# Altium schematic symbol library CP-01.SchLib: 63 symbols
Pins are listed as number, name and electrical type; pins without a type are passive.

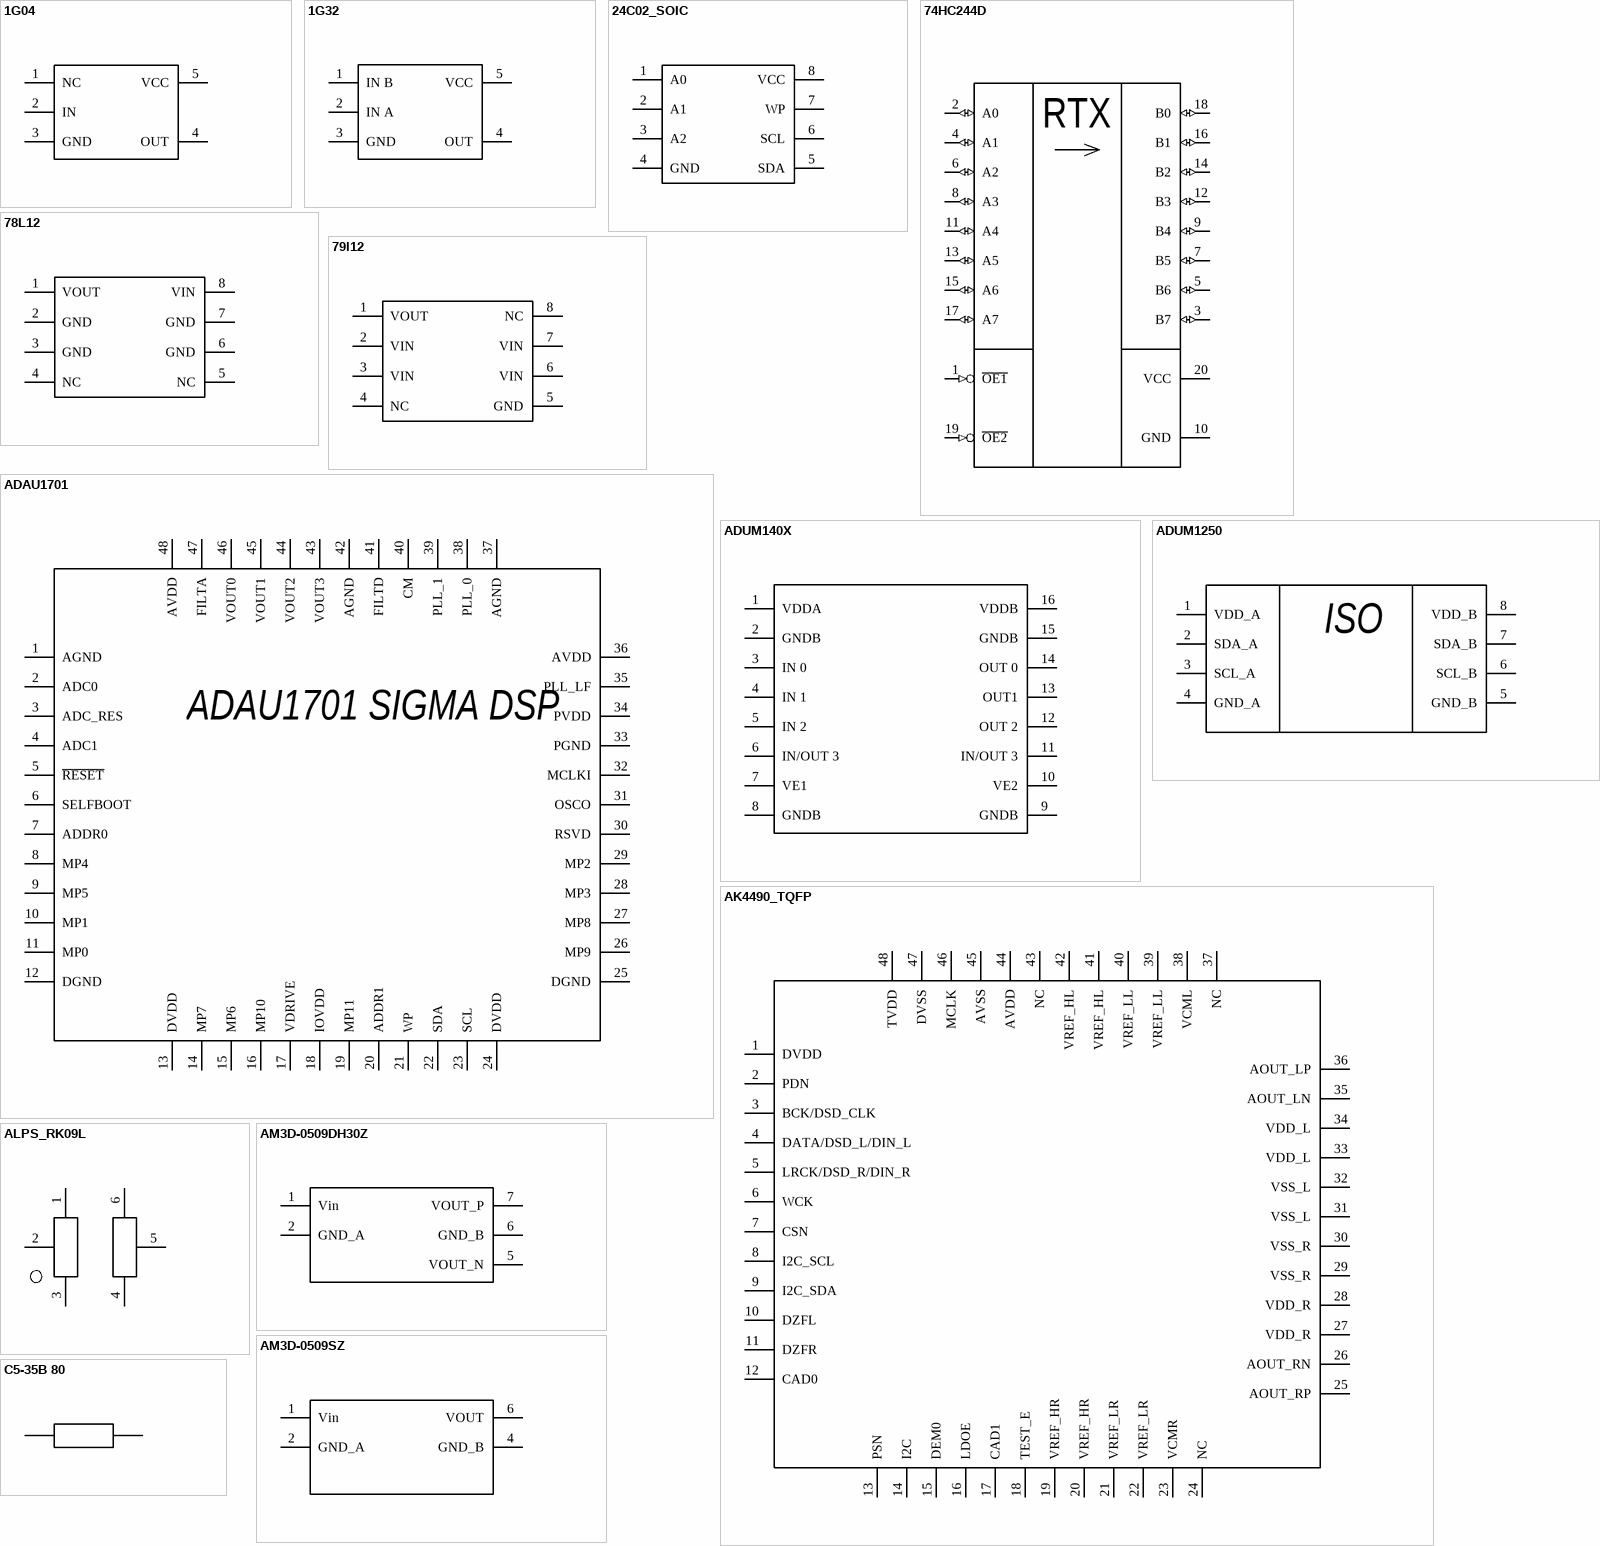
[diagram p0: symbols 1G04 to C5-35B 80]

## 1G04
designator D?, comment Обозначение при заказе  (value not drawn)
Описание свойств компонента
footprint SOT23-5P95_280X145L45X40N (Small Outline Transistor (SOT23), 0.95 mm pitch; 5 pin, 2.90 mm L X 1.60 mm W X 1.45 mm H body)
pins: 1 NC "Назначение вывода", 2 IN "Назначение вывода", 3 GND "Назначение вывода", 4 OUT "Назначение вывода", 5 VCC "Назначение вывода"

## 1G32
designator D?, comment Обозначение при заказе  (value not drawn)
Описание свойств компонента
footprint SOT23-5P95_280X145L45X40N (Small Outline Transistor (SOT23), 0.95 mm pitch; 5 pin, 2.90 mm L X 1.60 mm W X 1.45 mm H body)
pins: 1 IN B "Назначение вывода", 2 IN A "Назначение вывода", 3 GND "Назначение вывода", 4 OUT "Назначение вывода", 5 VCC "Назначение вывода"

## 24C02_SOIC
designator D?, comment Обозначение при заказе  (value not drawn)
Описание свойств компонента
footprint SOIC8P127_490X600X175L65X42N (Small Outline IC (SOIC), 1.27 mm pitch; 8 pin, 4.905 mm L X 3.90 mm W X 1.75 mm H body)
pins: 1 A0 "Назначение вывода", 2 A1 "Назначение вывода", 3 A2 "Назначение вывода", 4 GND "Назначение вывода", 5 SDA "Назначение вывода", 6 SCL "Назначение вывода", 7 WP "Назначение вывода", 8 VCC "Назначение вывода"

## 74HC244D
designator X?, comment Обозначение при заказе  (value not drawn)
Описание свойств компонента
footprint SOIC20P127_1280X1031X265L83X41N (Small Outline IC (SOIC), 1.27 mm pitch; 20 pin, 12.80 mm L X 7.50 mm W X 2.65 mm H body)
pins: 1 ~{OE1} (in) "Управление направлением", 2 A0 (io) "Канал 1", 3 B7 (io) "GND", 4 A1 (io) "Управление направлением", 5 B6 (io) "GND", 6 A2 (io) "Управление направлением", 7 B5 (io) "GND", 8 A3 (io) "Управление направлением", 9 B4 (io) "GND", 10 GND (power), 11 A4 (io) "Управление направлением", 12 B3 (io) "GND", 13 A5 (io) "Управление направлением", 14 B2 (io) "GND", 15 A6 (io) "Управление направлением", 16 B1 (io) "GND", 17 A7 (io) "Управление направлением", 18 B0 (io) "GND", 19 ~{OE2} (in) "GND", 20 VCC (power) "Vcc"
text: RTX

## 78L12
designator X?, comment Обозначение при заказе  (value not drawn)
Описание свойств компонента
footprint RT424012
pins: 1 VOUT "Назначение вывода", 2 GND "Назначение вывода", 3 GND "Назначение вывода", 4 NC "Назначение вывода", 5 NC "Назначение вывода", 6 GND "Назначение вывода", 7 GND "Назначение вывода", 8 VIN "Назначение вывода"

## 79l12
designator X?, comment Обозначение при заказе  (value not drawn)
Описание свойств компонента
pins: 1 VOUT "Назначение вывода", 2 VIN "Назначение вывода", 3 VIN "Назначение вывода", 4 NC "Назначение вывода", 5 GND "Назначение вывода", 6 VIN "Назначение вывода", 7 VIN "Назначение вывода", 8 NC "Назначение вывода"

## ADAU1701
designator X?, comment ADAU1701JSTZ  (value not drawn)
SigmaDSP 28-/56-Bit Audio Processor with Two ADCs and Four DACs
footprint QFP50P900X900X160-48N
pins: 1 AGND "Назначение вывода", 2 ADC0 "Назначение вывода", 3 ADC_RES "Назначение вывода", 4 ADC1 "Назначение вывода", 5 ~{RESET} "Назначение вывода", 6 SELFBOOT "Назначение вывода", 7 ADDR0 "Назначение вывода", 8 MP4 "Назначение вывода", 9 MP5 "Назначение вывода", 10 MP1 "Назначение вывода", 11 MP0 "Назначение вывода", 12 DGND "Назначение вывода", 13 DVDD "Назначение вывода", 14 MP7 "Назначение вывода", 15 MP6 "Назначение вывода", 16 MP10 "Назначение вывода", 17 VDRIVE "Назначение вывода", 18 IOVDD "Назначение вывода", 19 MP11 "Назначение вывода", 20 ADDR1 "Назначение вывода", 21 WP "Назначение вывода", 22 SDA "Назначение вывода", 23 SCL "Назначение вывода", 24 DVDD "Назначение вывода", 25 DGND "Назначение вывода", 26 MP9 "Назначение вывода", 27 MP8 "Назначение вывода", 28 MP3 "Назначение вывода", 29 MP2 "Назначение вывода", 30 RSVD "Назначение вывода", 31 OSCO "Назначение вывода", 32 MCLKI "Назначение вывода", 33 PGND "Назначение вывода", 34 PVDD "Назначение вывода", 35 PLL_LF "Назначение вывода", 36 AVDD "Назначение вывода", 37 AGND "Назначение вывода", 38 PLL_0 "Назначение вывода", 39 PLL_1 "Назначение вывода", 40 CM "Назначение вывода", 41 FILTD "Назначение вывода", 42 AGND "Назначение вывода", 43 VOUT3 "Назначение вывода", 44 VOUT2 "Назначение вывода", 45 VOUT1 "Назначение вывода", 46 VOUT0 "Назначение вывода", 47 FILTA "Назначение вывода", 48 AVDD "Назначение вывода"
text: ADAU1701 SIGMA DSP

## ADUM140X
designator D?, comment Обозначение при заказе  (value not drawn)
Описание свойств компонента
footprint adum1400
pins: 1 VDDA "Назначение вывода", 2 GNDB "Назначение вывода", 3 IN 0 "Назначение вывода", 4 IN 1 "Назначение вывода", 5 IN 2 "Назначение вывода", 6 IN/OUT 3 "Назначение вывода", 7 VE1 "Назначение вывода", 8 GNDB "Назначение вывода", 9 GNDB "Назначение вывода", 10 VE2 "Назначение вывода", 11 IN/OUT 3 "Назначение вывода", 12 OUT 2 "Назначение вывода", 13 OUT1 "Назначение вывода", 14 OUT 0 "Назначение вывода", 15 GNDB "Назначение вывода", 16 VDDB "Назначение вывода"

## ADUM1250
designator D?, comment Обозначение при заказе  (value not drawn)
Описание свойств компонента
footprint SOIC8P127_490X600X175L65X42N (Small Outline IC (SOIC), 1.27 mm pitch; 8 pin, 4.905 mm L X 3.90 mm W X 1.75 mm H body)
pins: 1 VDD_A "Назначение вывода", 2 SDA_A "Назначение вывода", 3 SCL_A "Назначение вывода", 4 GND_A "Назначение вывода", 5 GND_B "Назначение вывода", 6 SCL_B "Назначение вывода", 7 SDA_B "Назначение вывода", 8 VDD_B "Назначение вывода"
text: ISO

## AK4490_TQFP
designator D?, comment Обозначение при заказе  (value not drawn)
Описание свойств компонента
footprint QFP50P900X900X160-48N
pins: 1 DVDD "Назначение вывода", 2 PDN "Назначение вывода", 3 BCK/DSD_CLK "Назначение вывода", 4 DATA/DSD_L/DIN_L "Назначение вывода", 5 LRCK/DSD_R/DIN_R "Назначение вывода", 6 WCK "Назначение вывода", 7 CSN "Назначение вывода", 8 I2C_SCL "Назначение вывода", 9 I2C_SDA "Назначение вывода", 10 DZFL "Назначение вывода", 11 DZFR "Назначение вывода", 12 CAD0 "Назначение вывода", 13 PSN "Назначение вывода", 14 I2C "Назначение вывода", 15 DEM0 "Назначение вывода", 16 LDOE "Назначение вывода", 17 CAD1 "Назначение вывода", 18 TEST_E "Назначение вывода", 19 VREF_HR "Назначение вывода", 20 VREF_HR "Назначение вывода", 21 VREF_LR "Назначение вывода", 22 VREF_LR "Назначение вывода", 23 VCMR "Назначение вывода", 24 NC "Назначение вывода", 25 AOUT_RP "Назначение вывода", 26 AOUT_RN "Назначение вывода", 27 VDD_R "Назначение вывода", 28 VDD_R "Назначение вывода", 29 VSS_R "Назначение вывода", 30 VSS_R "Назначение вывода", 31 VSS_L "Назначение вывода", 32 VSS_L "Назначение вывода", 33 VDD_L "Назначение вывода", 34 VDD_L "Назначение вывода", 35 AOUT_LN "Назначение вывода", 36 AOUT_LP "Назначение вывода", 37 NC "Назначение вывода", 38 VCML "Назначение вывода", 39 VREF_LL "Назначение вывода", 40 VREF_LL "Назначение вывода", 41 VREF_HL "Назначение вывода", 42 VREF_HL "Назначение вывода", 43 NC "Назначение вывода", 44 AVDD "Назначение вывода", 45 AVSS "Назначение вывода", 46 MCLK "Назначение вывода", 47 DVSS "Назначение вывода", 48 TVDD "Назначение вывода"

## ALPS_RK09L
designator R?, comment Обозначение при заказе  (value not drawn)
Описание свойств компонента
footprint RK09L
pins: 1 "Назначение вывода", 2 "Назначение вывода", 3 "Назначение вывода", 4 "Назначение вывода", 5 "Назначение вывода", 6 "Назначение вывода"

## AM3D-0509DH30Z
designator D?, comment Обозначение при заказе  (value not drawn)
Описание свойств компонента
footprint AM3D-0509DH30Z
pins: 1 Vin "Назначение вывода", 2 GND_A "Назначение вывода", 5 VOUT_N "Назначение вывода", 6 GND_B "Назначение вывода", 7 VOUT_P "Назначение вывода"

## AM3D-0509SZ
designator D?, comment Обозначение при заказе  (value not drawn)
Описание свойств компонента
footprint AM3D-0509SZ
pins: 1 Vin "Назначение вывода", 2 GND_A "Назначение вывода", 4 GND_B "Назначение вывода", 6 VOUT "Назначение вывода"

## C5-35B 80
designator R?, comment Обозначение при заказе  (value not drawn)
Описание свойств компонента
footprint C5-35 80
pins: 1, 2

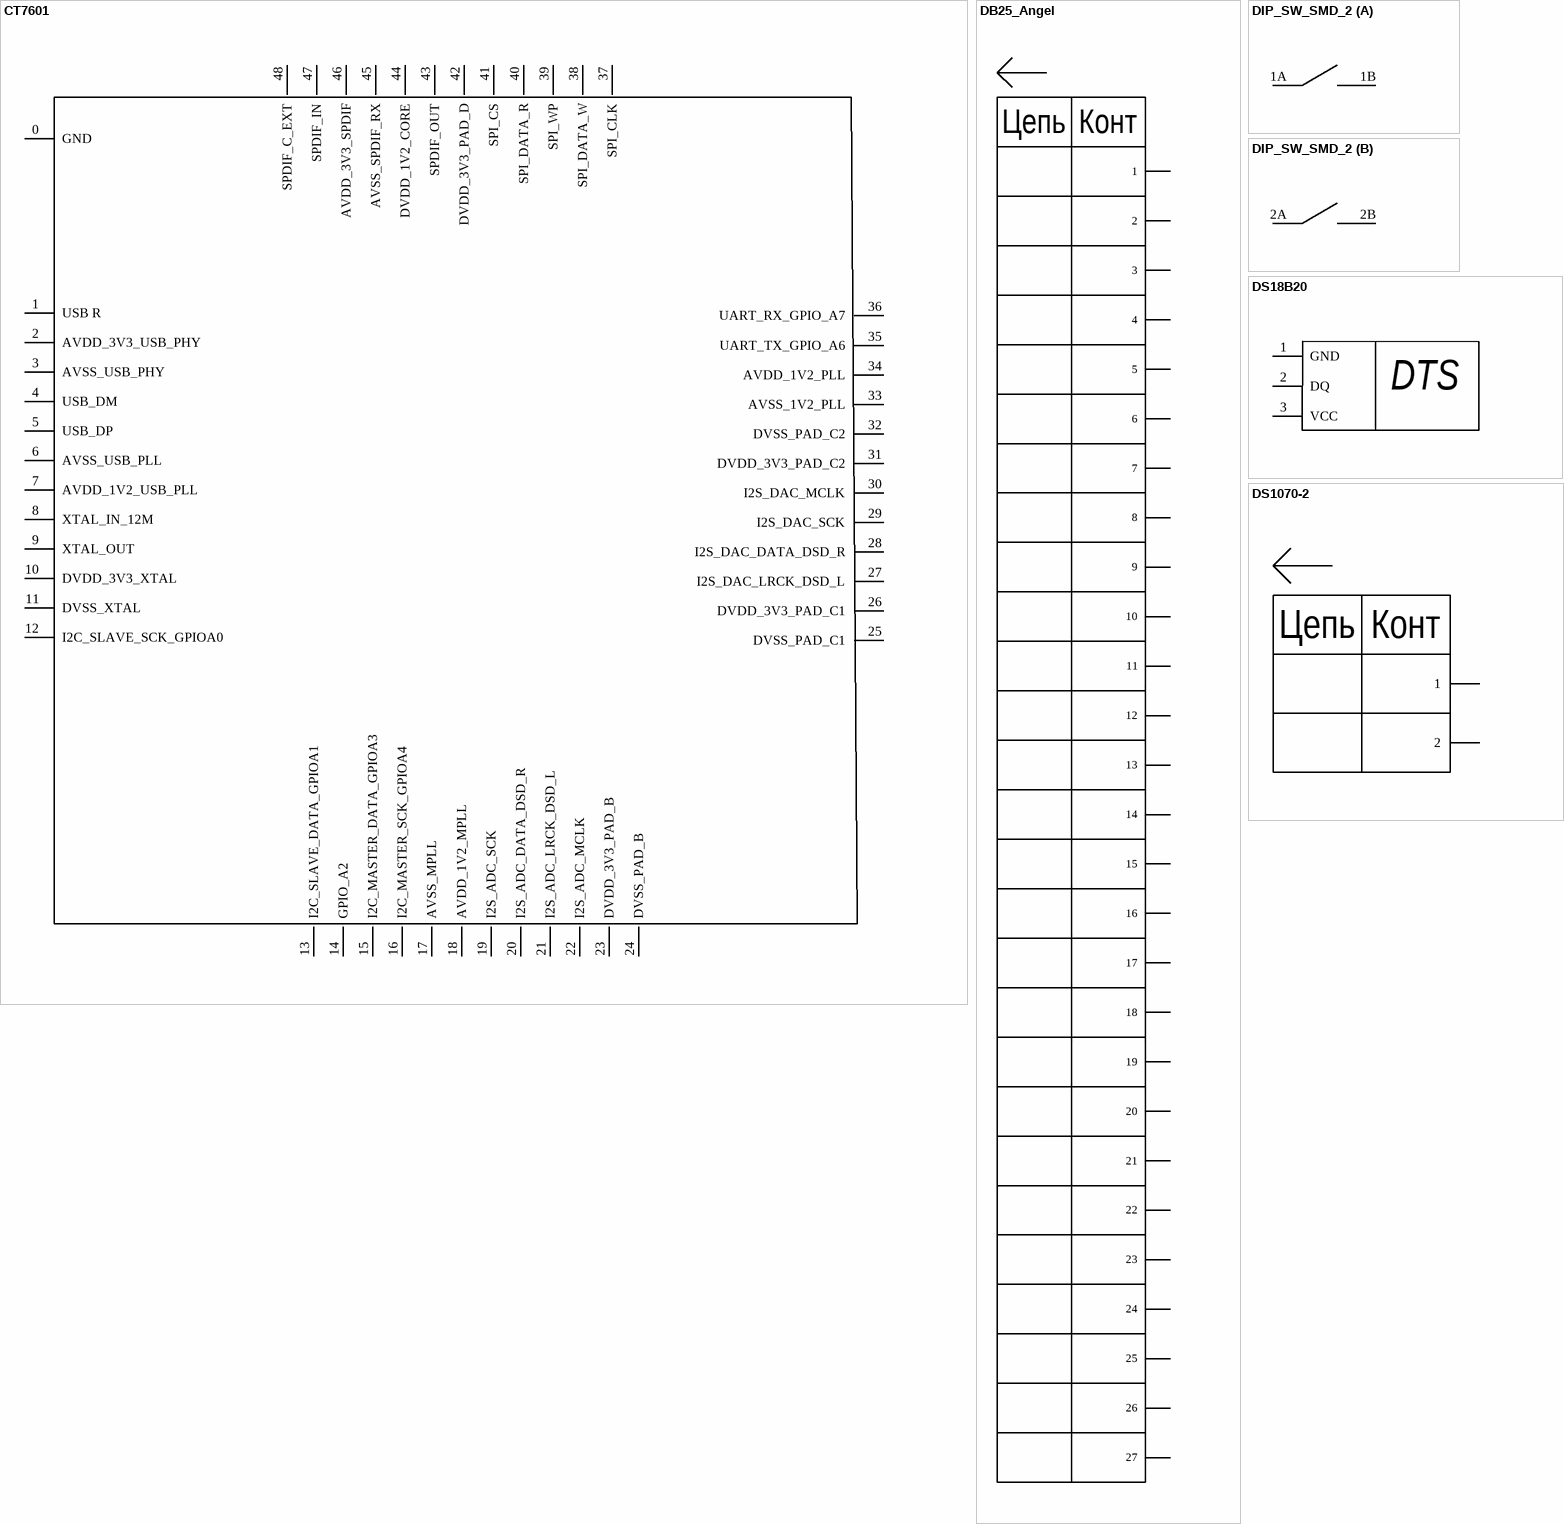
[diagram p1: symbols CT7601 to DS1070-2]

## CT7601
designator D?, comment Обозначение при заказе  (value not drawn)
Описание свойств компонента
footprint 48-QFN (6x6) (6x6 mm, pitch 0.4 mm, power pad)
pins: 0 GND "Назначение вывода", 1 USB R "Назначение вывода", 2 AVDD_3V3_USB_PHY "Назначение вывода", 3 AVSS_USB_PHY "Назначение вывода", 4 USB_DM "Назначение вывода", 5 USB_DP "Назначение вывода", 6 AVSS_USB_PLL "Назначение вывода", 7 AVDD_1V2_USB_PLL "Назначение вывода", 8 XTAL_IN_12M "Назначение вывода", 9 XTAL_OUT "Назначение вывода", 10 DVDD_3V3_XTAL "Назначение вывода", 11 DVSS_XTAL "Назначение вывода", 12 I2C_SLAVE_SCK_GPIOA0 "Назначение вывода", 13 I2C_SLAVE_DATA_GPIOA1 "Назначение вывода", 14 GPIO_A2 "Назначение вывода", 15 I2C_MASTER_DATA_GPIOA3 "Назначение вывода", 16 I2C_MASTER_SCK_GPIOA4 "Назначение вывода", 17 AVSS_MPLL "Назначение вывода", 18 AVDD_1V2_MPLL "Назначение вывода", 19 I2S_ADC_SCK "Назначение вывода", 20 I2S_ADC_DATA_DSD_R "Назначение вывода", 21 I2S_ADC_LRCK_DSD_L "Назначение вывода", 22 I2S_ADC_MCLK "Назначение вывода", 23 DVDD_3V3_PAD_B "Назначение вывода", 24 DVSS_PAD_B "Назначение вывода", 25 DVSS_PAD_C1 "Назначение вывода", 26 DVDD_3V3_PAD_C1 "Назначение вывода", 27 I2S_DAC_LRCK_DSD_L "Назначение вывода", 28 I2S_DAC_DATA_DSD_R "Назначение вывода", 29 I2S_DAC_SCK "Назначение вывода", 30 I2S_DAC_MCLK "Назначение вывода", 31 DVDD_3V3_PAD_C2 "Назначение вывода", 32 DVSS_PAD_C2 "Назначение вывода", 33 AVSS_1V2_PLL "Назначение вывода", 34 AVDD_1V2_PLL "Назначение вывода", 35 UART_TX_GPIO_A6 "Назначение вывода", 36 UART_RX_GPIO_A7 "Назначение вывода", 37 SPI_CLK "Назначение вывода", 38 SPI_DATA_W "Назначение вывода", 39 SPI_WP "Назначение вывода", 40 SPI_DATA_R "Назначение вывода", 41 SPI_CS "Назначение вывода", 42 DVDD_3V3_PAD_D "Назначение вывода", 43 SPDIF_OUT "Назначение вывода", 44 DVDD_1V2_CORE "Назначение вывода", 45 AVSS_SPDIF_RX "Назначение вывода", 46 AVDD_3V3_SPDIF "Назначение вывода", 47 SPDIF_IN "Назначение вывода", 48 SPDIF_C_EXT "Назначение вывода"

## DB25_Angel
designator X?, comment Обозначение при заказе  (value not drawn)
Описание свойств компонента
footprint DSUB1.385-2H25A_3D (Connector; D Subminiature; 25 Position; Right Angle; Pitch 1.385 mm)
pins: 1, 2, 3, 4, 5, 6, 7, 8, 9, 10, 11, 12, 13, 14, 15, 16, 17, 18, 19, 20, 21, 22, 23, 24, 25, 26, 27
text: Цепь; Конт

## DIP_SW_SMD_2
designator SW?, comment Обозначение при заказе  (value not drawn)
Описание свойств компонента
footprint SW_219-2MSTR
part A pins: 1A 1 "Назначение вывода", 1B 3 "Назначение вывода"
part B pins: 2A 1 "Назначение вывода", 2B 3 "Назначение вывода"

## DS18B20
designator DD?, comment Dallas temp sensor  (value not drawn)
DS18B20 TO92
footprint TO-92-TO92127P495H2044-3
pins: 1 GND "Назначение вывода", 2 DQ "Назначение вывода", 3 VCC "Назначение вывода"
text: DTS

## DS1070-2
designator X?, comment Обозначение при заказе  (value not drawn)
Описание свойств компонента
footprint DS1070-2
pins: 1, 2
text: Цепь; Конт

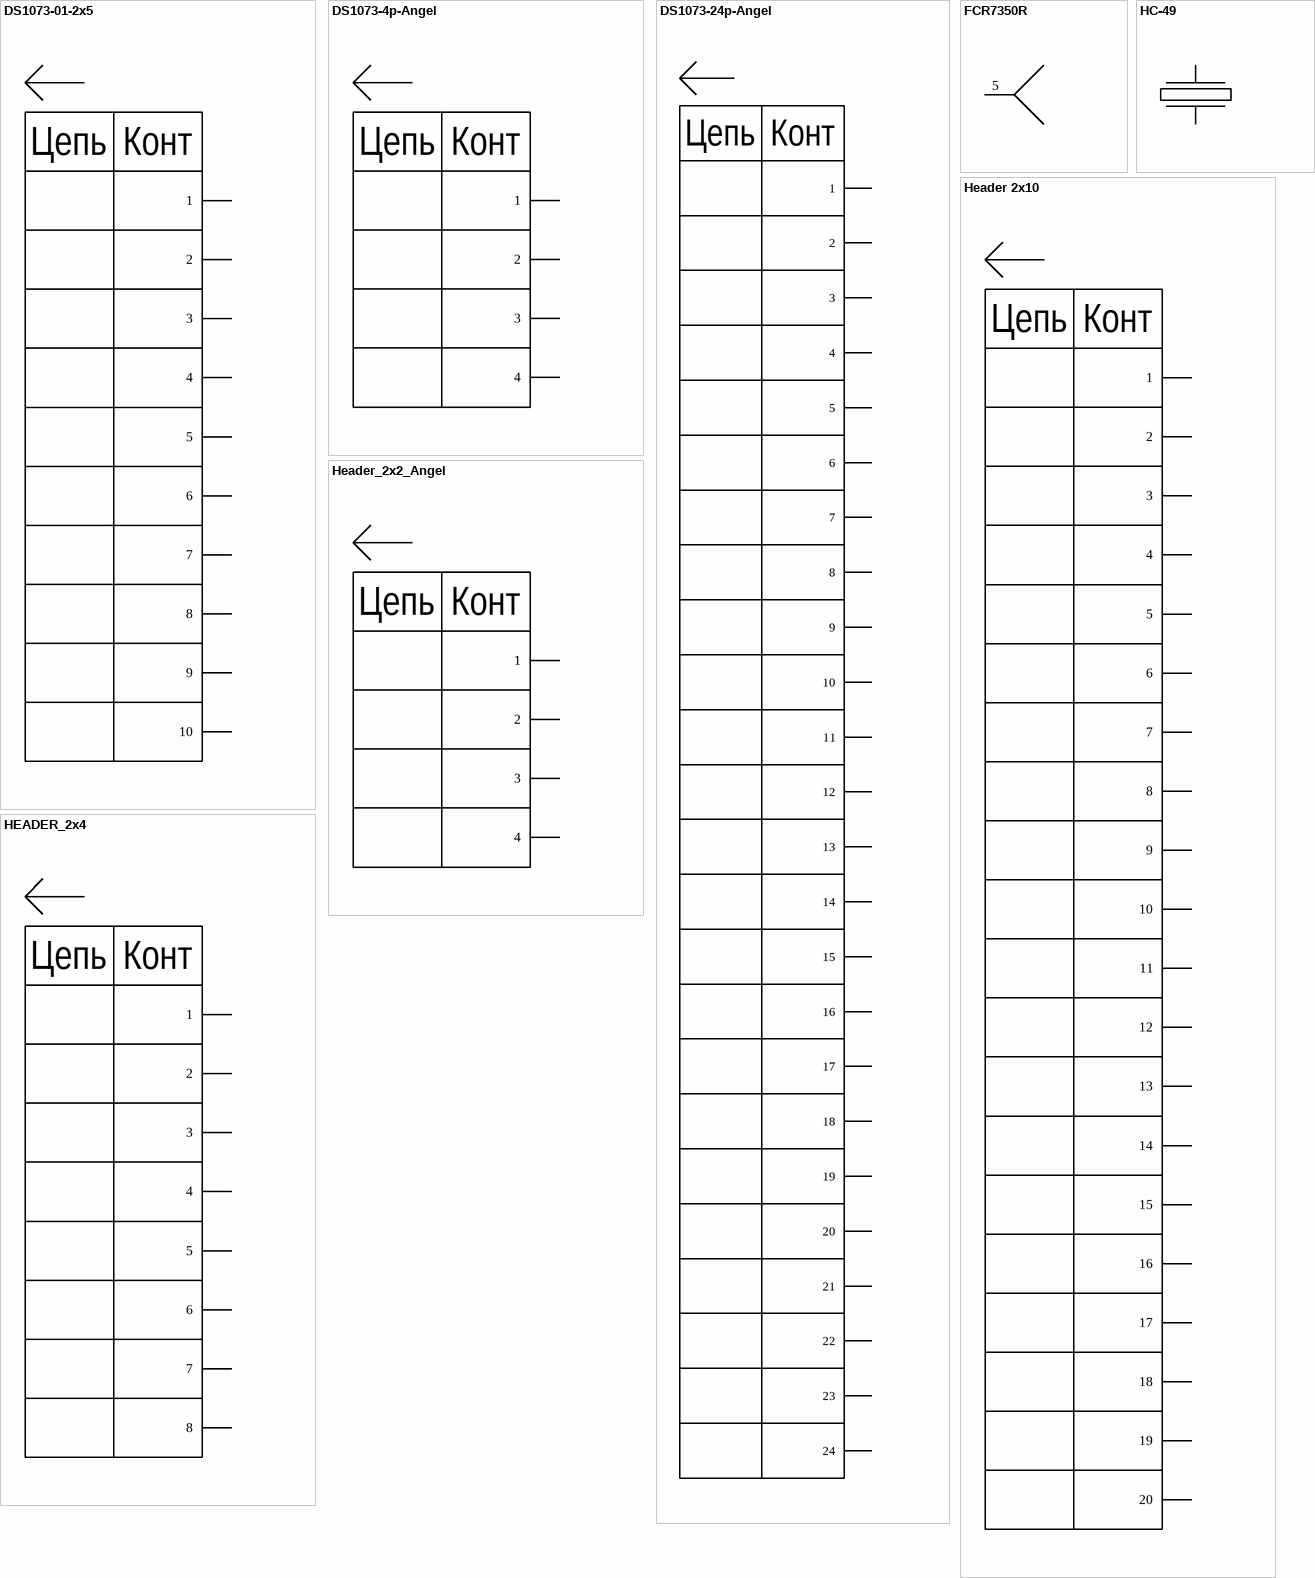
[diagram p2: symbols DS1073-01-2x5 to HEADER_2x4]

## DS1073-01-2x5
designator X?, comment Обозначение при заказе  (value not drawn)
Описание свойств компонента
footprint DS1073-01-2x5
pins: 1, 2, 3, 4, 5, 6, 7, 8, 9, 10
text: Цепь; Конт

## DS1073-4p-Angel
designator X?, comment Обозначение при заказе  (value not drawn)
Описание свойств компонента
footprint DS1073-4p-Angel
pins: 1, 2, 3, 4
text: Цепь; Конт

## DS1073-24p-Angel
designator X?, comment Обозначение при заказе  (value not drawn)
Описание свойств компонента
footprint D1073-24p-angel
pins: 1, 2, 3, 4, 5, 6, 7, 8, 9, 10, 11, 12, 13, 14, 15, 16, 17, 18, 19, 20, 21, 22, 23, 24
text: Цепь; Конт

## FCR7350R
designator X?, comment Обозначение при заказе  (value not drawn)
Описание свойств компонента
footprint FCR7350R
pins: 5 "Назначение вывода"

## HC-49
designator X?, comment Обозначение при заказе  (value not drawn)
Описание свойств компонента
footprint HC-49
pins: 1, 2

## Header 2x10
designator X?, comment Обозначение при заказе  (value not drawn)
Описание свойств компонента
footprint HEADER_2x10
pins: 1, 2, 3, 4, 5, 6, 7, 8, 9, 10, 11, 12, 13, 14, 15, 16, 17, 18, 19, 20
text: Цепь; Конт

## Header_2x2_Angel
designator X?, comment Обозначение при заказе  (value not drawn)
Описание свойств компонента
footprint HDR2X2H (Connector; Header; 10x2 Position; Right Angle)
pins: 1, 2, 3, 4
text: Цепь; Конт

## HEADER_2x4
designator X?, comment Обозначение при заказе  (value not drawn)
Описание свойств компонента
footprint HEADER_2x4
pins: 1, 2, 3, 4, 5, 6, 7, 8
text: Цепь; Конт

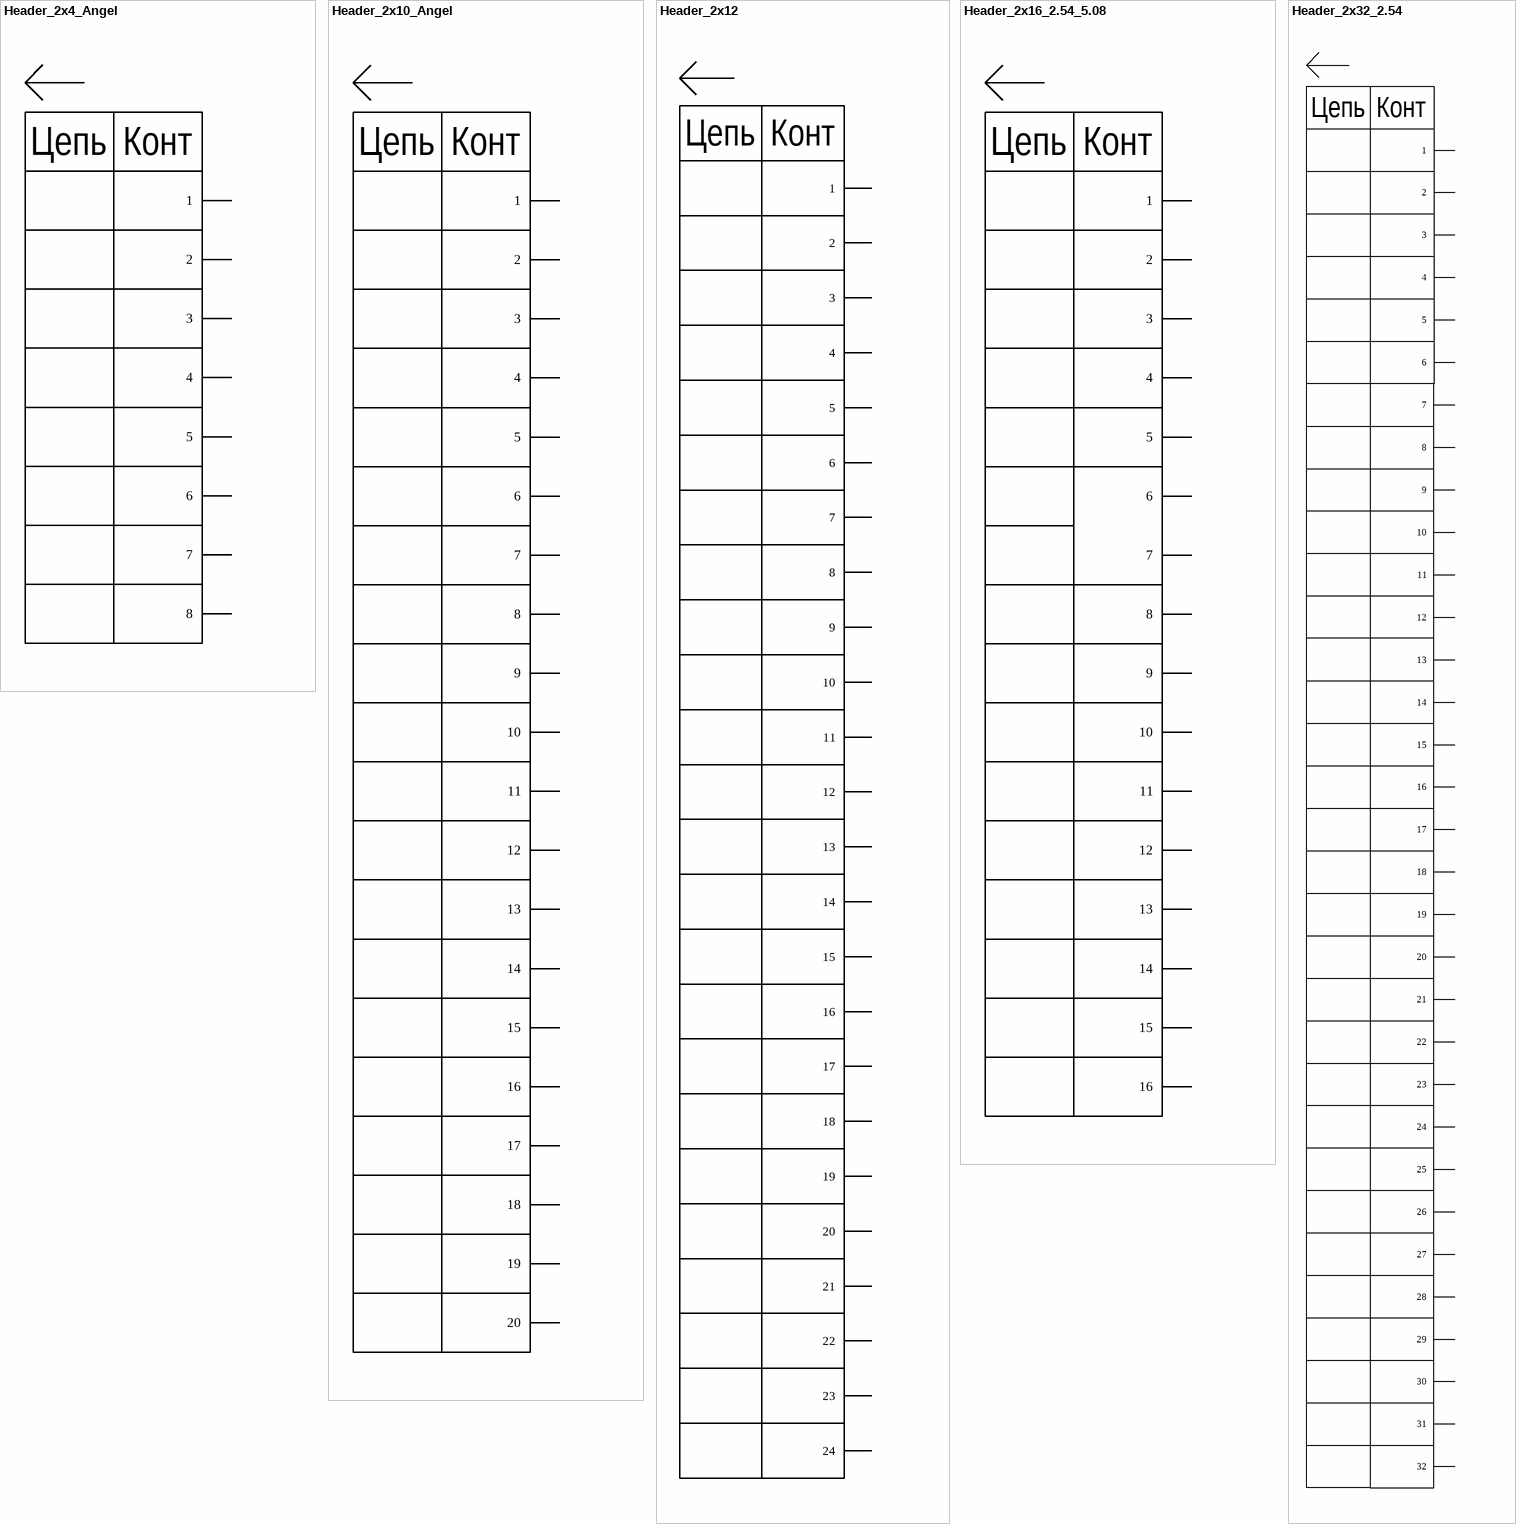
[diagram p3: symbols Header_2x4_Angel to Header_2x32_2.54]

## Header_2x4_Angel
designator X?, comment Обозначение при заказе  (value not drawn)
Описание свойств компонента
footprint HDR2X4H (Connector; Header; 10x2 Position; Right Angle)
pins: 1, 2, 3, 4, 5, 6, 7, 8
text: Цепь; Конт

## Header_2x10_Angel
designator X?, comment Обозначение при заказе  (value not drawn)
Описание свойств компонента
footprint HDR2X10H (Connector; Header; 10x2 Position; Right Angle)
pins: 1, 2, 3, 4, 5, 6, 7, 8, 9, 10, 11, 12, 13, 14, 15, 16, 17, 18, 19, 20
text: Цепь; Конт

## Header_2x12
designator X?, comment Обозначение при заказе  (value not drawn)
Описание свойств компонента
footprint HEADER 2x12
pins: 1, 2, 3, 4, 5, 6, 7, 8, 9, 10, 11, 12, 13, 14, 15, 16, 17, 18, 19, 20, 21, 22, 23, 24
text: Цепь; Конт

## Header_2x16_2.54_5.08
designator X?, comment Обозначение при заказе  (value not drawn)
Описание свойств компонента
footprint HEADER_2x16_2.54_5.08
pins: 1, 2, 3, 4, 5, 6, 7, 8, 9, 10, 11, 12, 13, 14, 15, 16
text: Цепь; Конт

## Header_2x32_2.54
designator X?, comment Обозначение при заказе  (value not drawn)
Описание свойств компонента
pins: 1, 2, 3, 4, 5, 6, 7, 8, 9, 10, 11, 12, 13, 14, 15, 16, 17, 18, 19, 20, 21, 22, 23, 24, 25, 26, 27, 28, 29, 30, 31, 32
text: Цепь; Конт

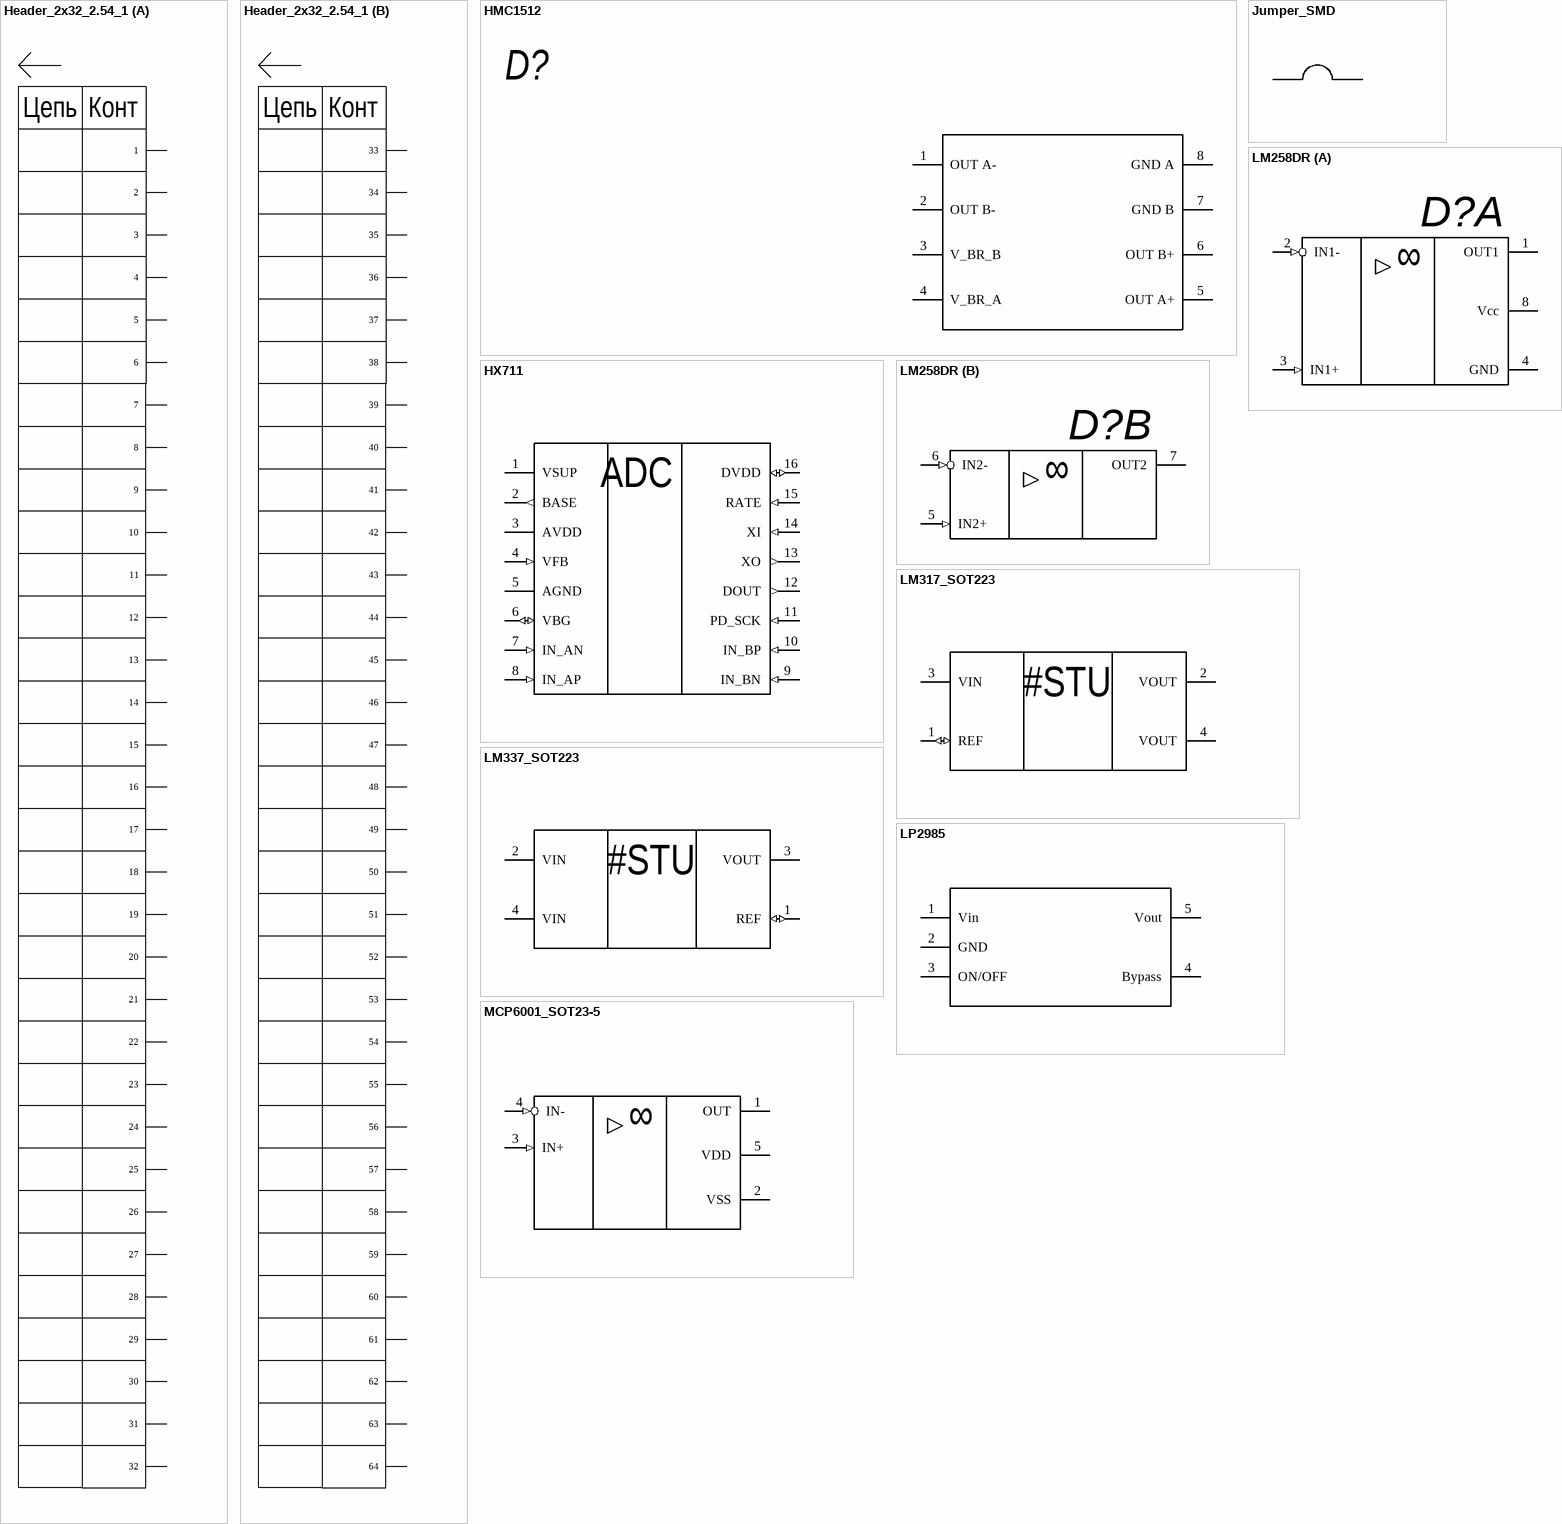
[diagram p4: symbols Header_2x32_2.54_1 to MCP6001_SOT23-5]

## Header_2x32_2.54_1
designator X?, comment Обозначение при заказе  (value not drawn)
Описание свойств компонента
footprint HEADER_2x32_2.54
part A pins: 1, 2, 3, 4, 5, 6, 7, 8, 9, 10, 11, 12, 13, 14, 15, 16, 17, 18, 19, 20, 21, 22, 23, 24, 25, 26, 27, 28, 29, 30, 31, 32
part B pins: 33, 34, 35, 36, 37, 38, 39, 40, 41, 42, 43, 44, 45, 46, 47, 48, 49, 50, 51, 52, 53, 54, 55, 56, 57, 58, 59, 60, 61, 62, 63, 64
part A text: Цепь; Конт
part B text: Цепь; Конт

## HMC1512
designator D?, comment Magnetic Displacement Sensors  (value not drawn)
The Honeywell HMC1501 and HMC1512 are miniature surface mount sensors / for linear, angular, or rotary displacement designed for magnetic saturating field / sensing.
footprint SOIC8P127_490X600X175L83X42N (Small Outline IC (SOIC), 1.27 mm pitch; 8 pin, 4.905 mm L X 3.90 mm W X 1.75 mm H body)
pins: 1 OUT A- "Назначение вывода", 2 OUT B- "Назначение вывода", 3 V_BR_B "Назначение вывода", 4 V_BR_A "Назначение вывода", 5 OUT A+ "Назначение вывода", 6 OUT B+ "Назначение вывода", 7 GND B "Назначение вывода", 8 GND A "Назначение вывода"

## HX711
designator D?, comment Обозначение при заказе  (value not drawn)
24-Bit Analog-to-Digital Converter (ADC) for Weigh Scales
footprint SOIC16P127_990X600X175L65X42N (Small Outline IC (SOIC), 1.27 mm pitch; 16 pin, 9.90 mm L X 3.90 mm W X 1.75 mm H body)
pins: 1 VSUP (power) "Regulator Power", 2 BASE (out) "Regulator Control Output", 3 AVDD (power) "Управление направлением", 4 VFB (in) "Regulator Control Input", 5 AGND (power) "Analog Ground", 6 VBG (io) "Reference Bypass", 7 IN_AN (in) "Ch. A Negative Input", 8 IN_AP (in) "Ch. A Positive Input", 9 IN_BN (in) "GND", 10 IN_BP (in) "GND", 11 PD_SCK (in) "Power Down and Serial Clock Input", 12 DOUT (out) "Serial Data Output", 13 XO (out) "Crystal I/O", 14 XI (in) "Crystal I/O and External Clock Input", 15 RATE (in) "Output Data Rate Control Input", 16 DVDD (io) "GND"
text: ADC

## Jumper_SMD
designator J?, comment no bom  (value not drawn)
smd jumper
footprint Jumper_SMD
pins: 1 "Назначение вывода", 2 "Назначение вывода"

## LM258DR
designator D?  (value not drawn)
Dual standard, industrial-grade, operational amplifier 8-SOIC -25 to 85; Manufacturer 1: Texas Instruments; Bandwidth: 1MHz; Min Dual Supply Voltage: 3.5V; Max Dual Supply Voltage: 18V; Voltage Gain: 75.56dB; Dual Supply Voltage: 9V; Nominal Supply Current: 500uA; Common Mode Rejection Ratio: 80dB; Number of Channels: 2; Slew Rate: 3.5V/µs; Max I/O Voltage: 6mV; Input Offset Voltage (Vos): 3mV; Input Bias Current: 200pA; Operating Supply Current: 200uA; Output Current: 30mA; Min Supply Voltage: 3V; Amplifier Type: GENERAL PURPOSE; Supply Current: 1.2mA; Type: Микросхема; Value: LM258; Manufacturer Part Number 1: LM258DR; RoHS: Yes; Category: Amplifiers - Op Amps, Buffer, Instrumentation; Stock 1: 59536; Pricing 1: 2500=0,11900 (USD); Case/Package: SOIC-8-150; Number of Pins: 8; Min Operating Temperature: -40°C; Max Operating Temperature: 85°C; Unity Gain Bandwidth Product: 1MHz; Packaging: Rail/Tube; Package Quantity: 50; Nominal Gain Bandwidth Product: 1MHz; Gain Bandwidth Product: 1MHz; Number of Circuits: 2; Number of Elements: 2; Operating Supply Voltage: 18V; Number of Amplifiers: 2; Max Supply Current: 500uA; Length: 9.81mm; Width: 6.35mm; Height: 4.57mm; Radiation Hardening: No; Lead Free: Lead Free; RoHS Compliant: Yes; REACH SVHC: No SVHC; ComponentLink1URL: https://datasheet.ciiva.com/27051/1063193-27051334.pdf?src-supplier=Jameco; ComponentLink1Description: https://datasheet.ciiva.com/27051/1063193-27051334.pdf?src-supplier=Jameco; ComponentLink2URL: https://datasheet.ciiva.com/7738/1768032-7738657.pdf?src-supplier=Element14; ComponentLink2Description: https://datasheet.ciiva.com/7738/1768032-7738657.pdf?src-supplier=Element14; ComponentLink3URL: https://datasheet.ciiva.com/14151/tl06x-series-eng-tds-14151159.pdf?src-supplier=Distrelec; ComponentLink3Description: https://datasheet.ciiva.com/14151/tl06x-series-eng-tds-14151159.pdf?src-supplier=Distrelec; ComponentLink4URL: https://datasheet.ciiva.com/1797/tl062a-1797198.pdf?src-supplier=Digi-Key; ComponentLink4Description: https://datasheet.ciiva.com/1797/tl062a-1797198.pdf?src-supplier=Digi-Key; Manufacturer 2: Texas Instruments; Manufacturer Part Number 2: TL062ID; Stock 2: 9100; Pricing 2: 1=1,40000, 10=1,25400, 25=1,19000, 100=0,97760, 250=0,91388, 500=0,80762, 1000=0,70175 (USD); Contact Plating: Gold; Max Supply Voltage: 18V; ComponentLink5URL: https://datasheet.ciiva.com/15129/getdatasheetpartid-40375-15129693.pdf?src-supplier=Verical; ComponentLink5Description: https://datasheet.ciiva.com/15129/getdatasheetpartid-40375-15129693.pdf?src-supplier=Verical; ComponentLink6URL: https://datasheet.ciiva.com/1797/tl062a-1797276.pdf?src-supplier=Digi-Key; ComponentLink6Description: https://datasheet.ciiva.com/1797/tl062a-1797276.pdf?src-supplier=Digi-Key; ComponentLink7URL: https://datasheet.ciiva.com/7738/1634178-7738543.pdf?src-supplier=Element14; ComponentLink7Description: https://datasheet.ciiva.com/7738/1634178-7738543.pdf?src-supplier=Element14; ComponentLink8URL: https://datasheet.ciiva.com/2974/tl062-2974181.pdf?src-supplier=Avnet; ComponentLink8Description: https://datasheet.ciiva.com/2974/tl062-2974181.pdf?src-supplier=Avnet; ComponentLink9URL: https://datasheet.ciiva.com/48712/001011491-da-01-en-ic-opamp-jfet-1mhz-du-tl062id-soic-8-tid-48712330.pdf?src-supplier=Conrad; ComponentLink9Description: https://datasheet.ciiva.com/48712/001011491-da-01-en-ic-opamp-jfet-1mhz-du-tl062id-soic-8-tid-48712330.pdf?src-supplier=Conrad; Mount: SMT; Output Current per Channel: 30mA; Series: -; Technology: BIPOLAR; ComponentLink10URL: https://datasheet.ciiva.com/34302/1342934-34302235.pdf?src-supplier=Jameco; ComponentLink10Description: https://datasheet.ciiva.com/34302/1342934-34302235.pdf?src-supplier=Jameco; ComponentLink11URL: https://datasheet.ciiva.com/1795/lm258a-1795505.pdf?src-supplier=Digi-Key; ComponentLink11Description: https://datasheet.ciiva.com/1795/lm258a-1795505.pdf?src-supplier=Digi-Key; ComponentLink12URL: https://datasheet.ciiva.com/1795/lm258a-1795506.pdf?src-supplier=Digi-Key; ComponentLink12Description: https://datasheet.ciiva.com/1795/lm258a-1795506.pdf?src-supplier=Digi-Key; ComponentLink13URL: https://datasheet.ciiva.com/1795/lm258a-1795507.pdf?src-supplier=Digi-Key; ComponentLink13Description: https://datasheet.ciiva.com/1795/lm258a-1795507.pdf?src-supplier=Digi-Key; ComponentLink14URL: https://datasheet.ciiva.com/2973/lm358a-2973285.pdf?src-supplier=Avnet; ComponentLink14Description: https://datasheet.ciiva.com/2973/lm358a-2973285.pdf?src-supplier=Avnet; ComponentLink15URL: https://datasheet.ciiva.com/26223/lm358a-26223035.pdf?src-supplier=Avnet+Europe; ComponentLink15Description: https://datasheet.ciiva.com/26223/lm358a-26223035.pdf?src-supplier=Avnet+Europe; ComponentLink16URL: https://datasheet.ciiva.com/16464/lm358a-16464604.pdf?src-supplier=Avnet+Asia; ComponentLink16Description: https://datasheet.ciiva.com/16464/lm358a-16464604.pdf?src-supplier=Avnet+Asia; ComponentLink17URL: https://datasheet.ciiva.com/48711/001071481-da-01-en-ic-opamp-gp-700khz-du-lm258dr-soic-8-tid-48711227.pdf?src-supplier=Conrad; ComponentLink17Description: https://datasheet.ciiva.com/48711/001071481-da-01-en-ic-opamp-gp-700khz-du-lm258dr-soic-8-tid-48711227.pdf?src-supplier=Conrad; Supplier 1: Mouser; Supplier Part Number 1: 595-LM258DR
footprint SOIC8P127_490X600X175L83X42N (Small Outline IC (SOIC), 1.27 mm pitch; 8 pin, 4.905 mm L X 3.90 mm W X 1.75 mm H body)
footprint SOIC8P127_490X600X175L65X42N (Small Outline IC (SOIC), 1.27 mm pitch; 8 pin, 4.905 mm L X 3.90 mm W X 1.75 mm H body)
footprint DIP8
part A pins: 1 OUT1 (oc) "Выход 1", 2 IN1- (in), 3 IN1+ (in) "Назначение вывода", 4 GND (power), 8 Vcc (power) "Назначение вывода"
part B pins: 5 IN2+ (in) "Назначение вывода", 6 IN2- (in) "Назначение вывода", 7 OUT2 "Назначение вывода"
part A text: ∞
part B text: ∞

## LM317_SOT223
designator X?, comment Обозначение при заказе  (value not drawn)
Описание свойств компонента
footprint SOT223-4P230_700X180L92X75N (Small Outline Transistor (SOT223), 2.30 mm pitch; 4 pin, 6.50 mm L X 3.50 mm W X 1.80 mm H body)
pins: 1 REF (io), 2 VOUT (power) "Output voltage pin for the regulator", 3 VIN (power) "Input voltage pin for the regulator", 4 VOUT (power) "Output voltage pin for the regulator"
text: #STU

## LM337_SOT223
designator D?, comment Обозначение при заказе  (value not drawn)
Описание свойств компонента
footprint SOT223-4P230_700X180L92X75N (Small Outline Transistor (SOT223), 2.30 mm pitch; 4 pin, 6.50 mm L X 3.50 mm W X 1.80 mm H body)
pins: 1 REF (io), 2 VIN (power) "Input voltage pin for the regulator", 3 VOUT (power) "Output voltage pin for the regulator", 4 VIN (power) "Input voltage pin for the regulator"
text: #STU

## LP2985
designator D?, comment Обозначение при заказе  (value not drawn)
Описание свойств компонента
footprint SOT23-5P95_280X145L45X40N (Small Outline Transistor (SOT23), 0.95 mm pitch; 5 pin, 2.90 mm L X 1.60 mm W X 1.45 mm H body)
pins: 1 Vin "Назначение вывода", 2 GND "Назначение вывода", 3 ON/OFF "Назначение вывода", 4 Bypass "Назначение вывода", 5 Vout "Назначение вывода"

## MCP6001_SOT23-5
designator X?, comment Обозначение при заказе  (value not drawn)
Описание свойств компонента
footprint SOT23-5P95_280X145L45X40N (Small Outline Transistor (SOT23), 0.95 mm pitch; 5 pin, 2.90 mm L X 1.60 mm W X 1.45 mm H body)
pins: 1 OUT (oc) "Выход 1", 2 VSS (power) "GND", 3 IN+ (in) "Назначение вывода", 4 IN- (in), 5 VDD (power) "Назначение вывода"
text: ∞

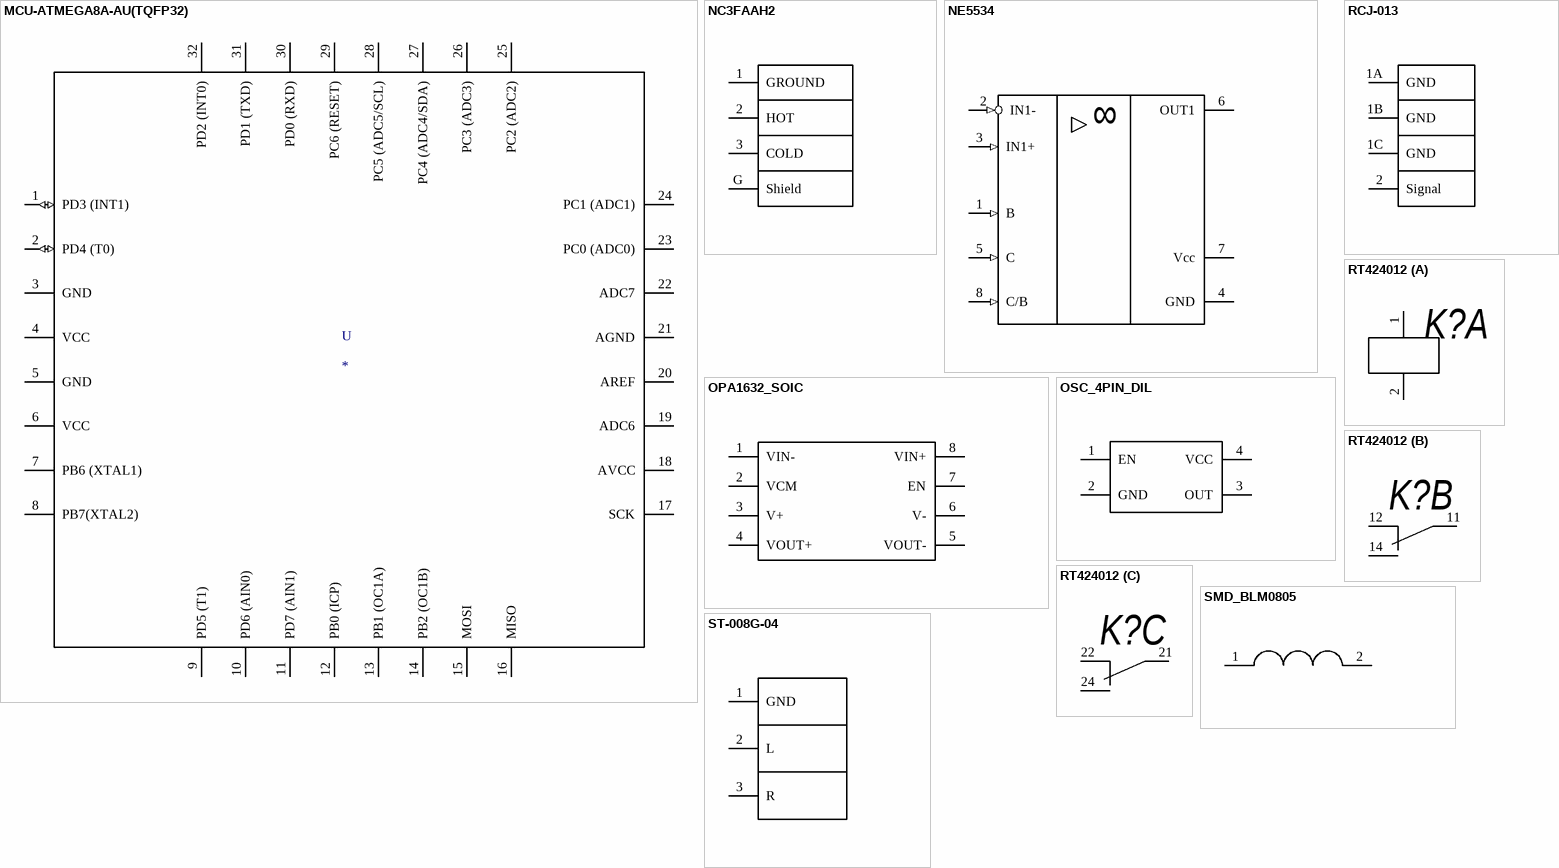
[diagram p5: symbols MCU-ATMEGA8A-AU(TQFP32) to ST-008G-04]

## MCU-ATMEGA8A-AU(TQFP32)
designator U
AVR AVRÂ® ATmega Microcontroller IC 8-Bit 16MHz 8KB _4K x 16_ FLASH 32-TQFP _7x7_; MP: ATMEGA8A-AU; MF: Microchip; Package: TQFP-32 Microchip; SnapEDA_Link: https://www.snapeda.com/parts/ATMEGA8A-AU/Microchip/view-part/49714/?ref=snap; Availability: Unavailable; Price: None; Value: *
footprint TQFP32-0.8-7X7MM
pins: 1 PD3 (INT1) (io) "Назначение вывода", 2 PD4 (T0) (io) "Назначение вывода", 3 GND (power) "Назначение вывода", 4 VCC (power) "Назначение вывода", 5 GND (power) "Назначение вывода", 6 VCC (power) "Назначение вывода", 7 PB6 (XTAL1) "Назначение вывода", 8 PB7(XTAL2) "Назначение вывода", 9 PD5 (T1) "Назначение вывода", 10 PD6 (AIN0) "Назначение вывода", 11 PD7 (AIN1) "Назначение вывода", 12 PB0 (ICP) "Назначение вывода", 13 PB1 (OC1A) "Назначение вывода", 14 PB2 (OC1B) "Назначение вывода", 15 MOSI "Назначение вывода", 16 MISO "Назначение вывода", 17 SCK "Назначение вывода", 18 AVCC "Назначение вывода", 19 ADC6 "Назначение вывода", 20 AREF "Назначение вывода", 21 AGND "Назначение вывода", 22 ADC7 "Назначение вывода", 23 PC0 (ADC0) "Назначение вывода", 24 PC1 (ADC1) "Назначение вывода", 25 PC2 (ADC2) "Назначение вывода", 26 PC3 (ADC3) "Назначение вывода", 27 PC4 (ADC4/SDA) "Назначение вывода", 28 PC5 (ADC5/SCL) "Назначение вывода", 29 PC6 (RESET) "Назначение вывода", 30 PD0 (RXD) "Назначение вывода", 31 PD1 (TXD) "Назначение вывода", 32 PD2 (INT0) "Назначение вывода"

## NC3FAAH2
designator X?, comment Обозначение при заказе  (value not drawn)
Описание свойств компонента
footprint NC3FAAH2
pins: 1 GROUND "Назначение вывода", 2 HOT "Назначение вывода", 3 COLD "Назначение вывода", G Shield "Назначение вывода"

## NE5534
designator X?, comment Обозначение при заказе  (value not drawn)
Описание свойств компонента
footprint DIP8
pins: 1 B (in) "Назначение вывода", 2 IN1- (in), 3 IN1+ (in) "Назначение вывода", 4 GND (power), 5 C (in) "Назначение вывода", 6 OUT1 (oc) "Выход 1", 7 Vcc (power) "Назначение вывода", 8 C/B (in) "Назначение вывода"
text: ∞

## OPA1632_SOIC
designator D?, comment Обозначение при заказе  (value not drawn)
Описание свойств компонента
footprint SOIC8P127_490X600X175L65X42N (Small Outline IC (SOIC), 1.27 mm pitch; 8 pin, 4.905 mm L X 3.90 mm W X 1.75 mm H body)
pins: 1 VIN- "Назначение вывода", 2 VCM "Назначение вывода", 3 V+ "Назначение вывода", 4 VOUT+ "Назначение вывода", 5 VOUT- "Назначение вывода", 6 V- "Назначение вывода", 7 EN "Назначение вывода", 8 VIN+ "Назначение вывода"

## OSC_4PIN_DIL
designator D?, comment Обозначение при заказе  (value not drawn)
Описание свойств компонента
footprint DIL4
pins: 1 EN "Назначение вывода", 2 GND "Назначение вывода", 3 OUT "Назначение вывода", 4 VCC "Назначение вывода"

## RCJ-013
designator X?, comment Обозначение при заказе  (value not drawn)
Описание свойств компонента
footprint RCJ-013
pins: 1A GND "Назначение вывода", 1B GND "Назначение вывода", 1C GND "Назначение вывода", 2 Signal "Назначение вывода"

## RT424012
designator K?  (value not drawn)
Electromechanical Relay; Manufacturer 1: Panasonic; Manufacturer Part Number 1: TX2-12V-TH; Coil Current: 11.7mA; Throw Configuration: DPDT; Coil Resistance: 1.028kR; Coil Voltage (DC): 12V; Max Current Rating: 7.5A; Max Voltage Rating (DC): 220V; Coil Type: Non-Latching; Contact Current Rating: 2A; Operate Time: 4ms; Coil Power: 140mW; Relay Type: General Purpose; Max Voltage Rating (AC): 250V; Supplier 1: Mouser; Supplier Part Number 1: 769-TX2-12V-TH; RoHS: Yes; Category: Signal Relays; Stock 1: 5; Pricing 1: 1=4,00000, 10=3,76000, 25=3,34000, 50=3,34000, 100=3,34000, 120=3,18000, 280=3,01000, 520=2,68000, 1000=2,36000, 5000=2,26000, 10000=2,36000 (USD); Mount: Through Hole; Case/Package: DIP; Number of Pins: 8; Contact Material: Gold,Silver; Weight: 2g; Min Operating Temperature: -40°C; Max Operating Temperature: 85°C; Package Quantity: 40; Packaging: Rail/Tube; Termination: PC Pin; Release Time: 4ms; Series: TX-TH; Voltage Rating (AC): 250V; Length: 15mm; Depth: 7.4mm; Lead Free: Lead Free; RoHS Compliant: Yes; ComponentLink1URL: https://datasheet.ciiva.com/2413/tx-relays-th-type-2413250.pdf?src-supplier=Digi-Key; ComponentLink1Description: https://datasheet.ciiva.com/2413/tx-relays-th-type-2413250.pdf?src-supplier=Digi-Key
footprint RT424012
part A pins: 1 "Вывод обмотки", 2 "Вывод обмотки"
part B pins: 11 "Назначение вывода", 12 "Назначение вывода", 14 "Назначение вывода"
part C pins: 21 "Назначение вывода", 22 "Назначение вывода", 24 "Назначение вывода"

## SMD_BLM0805
designator L?, comment Обозначение при заказе  (value not drawn)
Описание свойств компонента
footprint RESC200X125X60L35 (Resistor, Chip; 2.00 mm L X 1.25 mm W X 0.60 mm H body)
pins: 1 "Назначение вывода", 2 "Назначение вывода"

## ST-008G-04
designator X?, comment Обозначение при заказе  (value not drawn)
Описание свойств компонента
footprint ST-008G-04
pins: 1 GND "Назначение вывода", 2 L "Назначение вывода", 3 R "Назначение вывода"

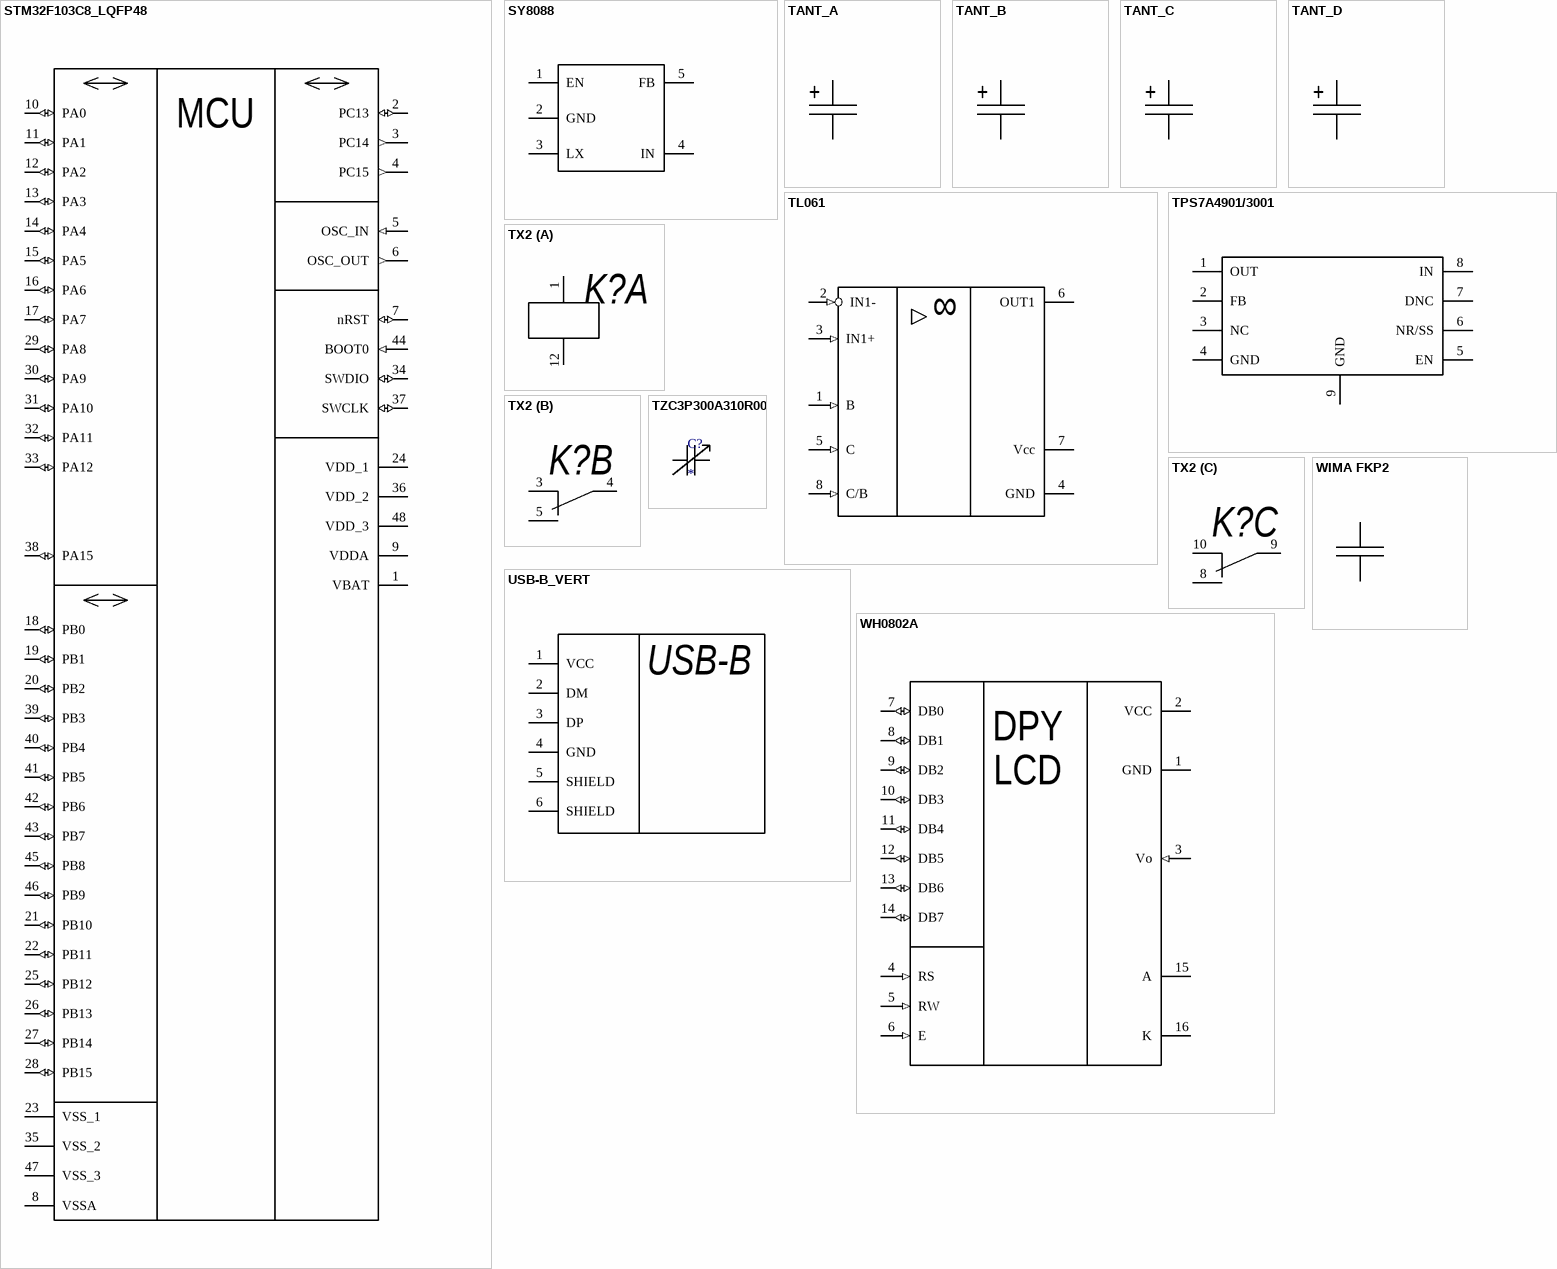
[diagram p6: symbols STM32F103C8_LQFP48 to WIMA FKP2]

## STM32F103C8_LQFP48
designator D?, comment ARM Cortex MCU  (value not drawn)
Описание свойств компонента
footprint QFP48P50_900X900X120L60X22N (Quad Flat Pack (QFP), 0.50 mm pitch; square, 12 pin X 12 pin, 7.00 mm L X 7.00 mm W X 1.20 mm H body)
pins: 1 VBAT (power) "Vbat", 2 PC13 (io) "OSC_IN", 3 PC14 (out) "OSC_OUT", 4 PC15 (out) "OSC_OUT", 5 OSC_IN (in), 6 OSC_OUT (out), 7 nRST (io), 8 VSSA (power), 9 VDDA (power), 10 PA0 (io) "PA0-WKUP", 11 PA1 (io), 12 PA2 (io), 13 PA3 (io), 14 PA4 (io), 15 PA5 (io), 16 PA6 (io), 17 PA7 (io), 18 PB0 (io), 19 PB1 (io), 20 PB2 (io), 21 PB10 (io), 22 PB11 (io), 23 VSS_1 (power), 24 VDD_1 (power), 25 PB12 (io), 26 PB13 (io), 27 PB14 (io), 28 PB15 (io), 29 PA8 (io), 30 PA9 (io), 31 PA10 (io), 32 PA11 (io), 33 PA12 (io), 34 SWDIO (io) "PA13/JTMS-SWDIO", 35 VSS_2 (power), 36 VDD_2 (power), 37 SWCLK (io) "PA14/JTCK-SWCLK", 38 PA15 (io), 39 PB3 (io) "PB3/TRACESWO", 40 PB4 (io), 41 PB5 (io), 42 PB6 (io), 43 PB7 (io), 44 BOOT0 (in), 45 PB8 (io), 46 PB9 (io), 47 VSS_3 (power) "VSS_2", 48 VDD_3 (power) "VDD_2"
text: MCU

## SY8088
designator D?, comment Обозначение при заказе  (value not drawn)
Описание свойств компонента
footprint SOT23-5P95_280X145L45X40N (Small Outline Transistor (SOT23), 0.95 mm pitch; 5 pin, 2.90 mm L X 1.60 mm W X 1.45 mm H body)
pins: 1 EN "Назначение вывода", 2 GND "Назначение вывода", 3 LX "Назначение вывода", 4 IN "Назначение вывода", 5 FB "Назначение вывода"

## TANT_A
designator C?, comment Обозначение при заказе  (value not drawn)
Описание свойств компонента
footprint TANT_A
pins: 1, 2
text: +

## TANT_B
designator C?, comment Обозначение при заказе  (value not drawn)
Описание свойств компонента
footprint TANT_B
pins: 1, 2
text: +

## TANT_C
designator C?, comment Обозначение при заказе  (value not drawn)
Описание свойств компонента
footprint TANT_C
pins: 1, 2
text: +

## TANT_D
designator C?, comment Обозначение при заказе  (value not drawn)
Описание свойств компонента
footprint TANT_D
pins: 1, 2
text: +

## TL061
designator D?, comment Обозначение при заказе  (value not drawn)
Описание свойств компонента
footprint SOIC8P127_490X600X175L83X42N (Small Outline IC (SOIC), 1.27 mm pitch; 8 pin, 4.905 mm L X 3.90 mm W X 1.75 mm H body)
pins: 1 B (in) "Назначение вывода", 2 IN1- (in), 3 IN1+ (in) "Назначение вывода", 4 GND (power), 5 C (in) "Назначение вывода", 6 OUT1 (oc) "Выход 1", 7 Vcc (power) "Назначение вывода", 8 C/B (in) "Назначение вывода"
text: ∞

## TPS7A4901/3001
designator D?, comment Обозначение при заказе  (value not drawn)
Описание свойств компонента
footprint SOP65P490X110-9N
pins: 1 OUT "Назначение вывода", 2 FB "Назначение вывода", 3 NC "Назначение вывода", 4 GND "Назначение вывода", 5 EN "Назначение вывода", 6 NR/SS "Назначение вывода", 7 DNC "Назначение вывода", 8 IN "Назначение вывода", 9 GND "Назначение вывода"

## TX2
designator K?, comment TX2-5V  (value not drawn)
Electromechanical Relay; Manufacturer 1: Panasonic; Manufacturer Part Number 1: TX2-12V-TH; Coil Current: 11.7mA; Throw Configuration: DPDT; Coil Resistance: 1.028kR; Coil Voltage (DC): 12V; Max Current Rating: 7.5A; Max Voltage Rating (DC): 220V; Coil Type: Non-Latching; Contact Current Rating: 2A; Operate Time: 4ms; Coil Power: 140mW; Relay Type: General Purpose; Max Voltage Rating (AC): 250V; Supplier 1: Mouser; Supplier Part Number 1: 769-TX2-12V-TH; RoHS: Yes; Category: Signal Relays; Stock 1: 5; Pricing 1: 1=4,00000, 10=3,76000, 25=3,34000, 50=3,34000, 100=3,34000, 120=3,18000, 280=3,01000, 520=2,68000, 1000=2,36000, 5000=2,26000, 10000=2,36000 (USD); Mount: Through Hole; Case/Package: DIP; Number of Pins: 8; Contact Material: Gold,Silver; Weight: 2g; Min Operating Temperature: -40°C; Max Operating Temperature: 85°C; Package Quantity: 40; Packaging: Rail/Tube; Termination: PC Pin; Release Time: 4ms; Series: TX-TH; Voltage Rating (AC): 250V; Length: 15mm; Depth: 7.4mm; Lead Free: Lead Free; RoHS Compliant: Yes; ComponentLink1URL: https://datasheet.ciiva.com/2413/tx-relays-th-type-2413250.pdf?src-supplier=Digi-Key; ComponentLink1Description: https://datasheet.ciiva.com/2413/tx-relays-th-type-2413250.pdf?src-supplier=Digi-Key
footprint TX2
part A pins: 1 3 "Вывод обмотки", 12 "Вывод обмотки"
part B pins: 3 "Назначение вывода", 4 "Назначение вывода", 5 "Назначение вывода"
part C pins: 8 "Назначение вывода", 9 "Назначение вывода", 10 "Назначение вывода"

## TZC3P300A310R00
designator C?
6.5 ~ 30pF Trimmer Capacitor 100V Top Surface Mount; MF: Murata; MP: TZC3P300A310R00; Package: SMD-2 Murata; SnapEDA_Link: https://www.snapeda.com/parts/TZC3P300A310R00/Murata/view-part/435195/?ref=snap; Value: *; Price: None; Availability: Bad
footprint CAPV_TZC3P300A310R00
pins: 1 A, 2 E

## USB-B_VERT
designator X?, comment Обозначение при заказе  (value not drawn)
Описание свойств компонента
footprint SAMTEC_USBR-B-S-S-O-VT
pins: 1 VCC "Назначение вывода", 2 DM "Назначение вывода", 3 DP "Назначение вывода", 4 GND "Назначение вывода", 5 SHIELD "Назначение вывода", 6 SHIELD "Назначение вывода"
text: USB-B

## WH0802A
designator X?, comment Обозначение при заказе  (value not drawn)
Описание свойств компонента
footprint WH0802A
pins: 1 GND (power) "Земля", 2 VCC (power) "Питание логической части", 3 Vo (in) "Настройка контраста", 4 RS (in) "Выбор информация/инструкции", 5 RW (in) "Выбор чтение или запись", 6 E (in) "Сигнал размещение", 7 DB0 (io) "Шина данных", 8 DB1 (io) "Шина данных", 9 DB2 (io) "Шина данных", 10 DB3 (io) "Шина данных", 11 DB4 (io) "Шина данных", 12 DB5 (io) "Шина данных", 13 DB6 (io) "Шина данных", 14 DB7 (io) "Шина данных", 15 A (power) "Питание подстветки (Анод)", 16 K (power) "Питание подстветки (Катод)"
text: DPY; LCD

## WIMA FKP2
designator C?  (value not drawn)
Описание свойств компонента
footprint WIMA FKP2
pins: 1, 2